# Altium footprint library TitansLib.PcbLib: 333 footprints (part 7 of 21)
Each footprint in its own frame and in the unit in brackets; x right, y up, seen from the top. Pads: shape width x height; smd on the part's side, far side on the other; paste and mask are expansions set on the pad; w line width, h text height; cw(c..) or ccw(c..) is an arc to the next point about the centre after c.
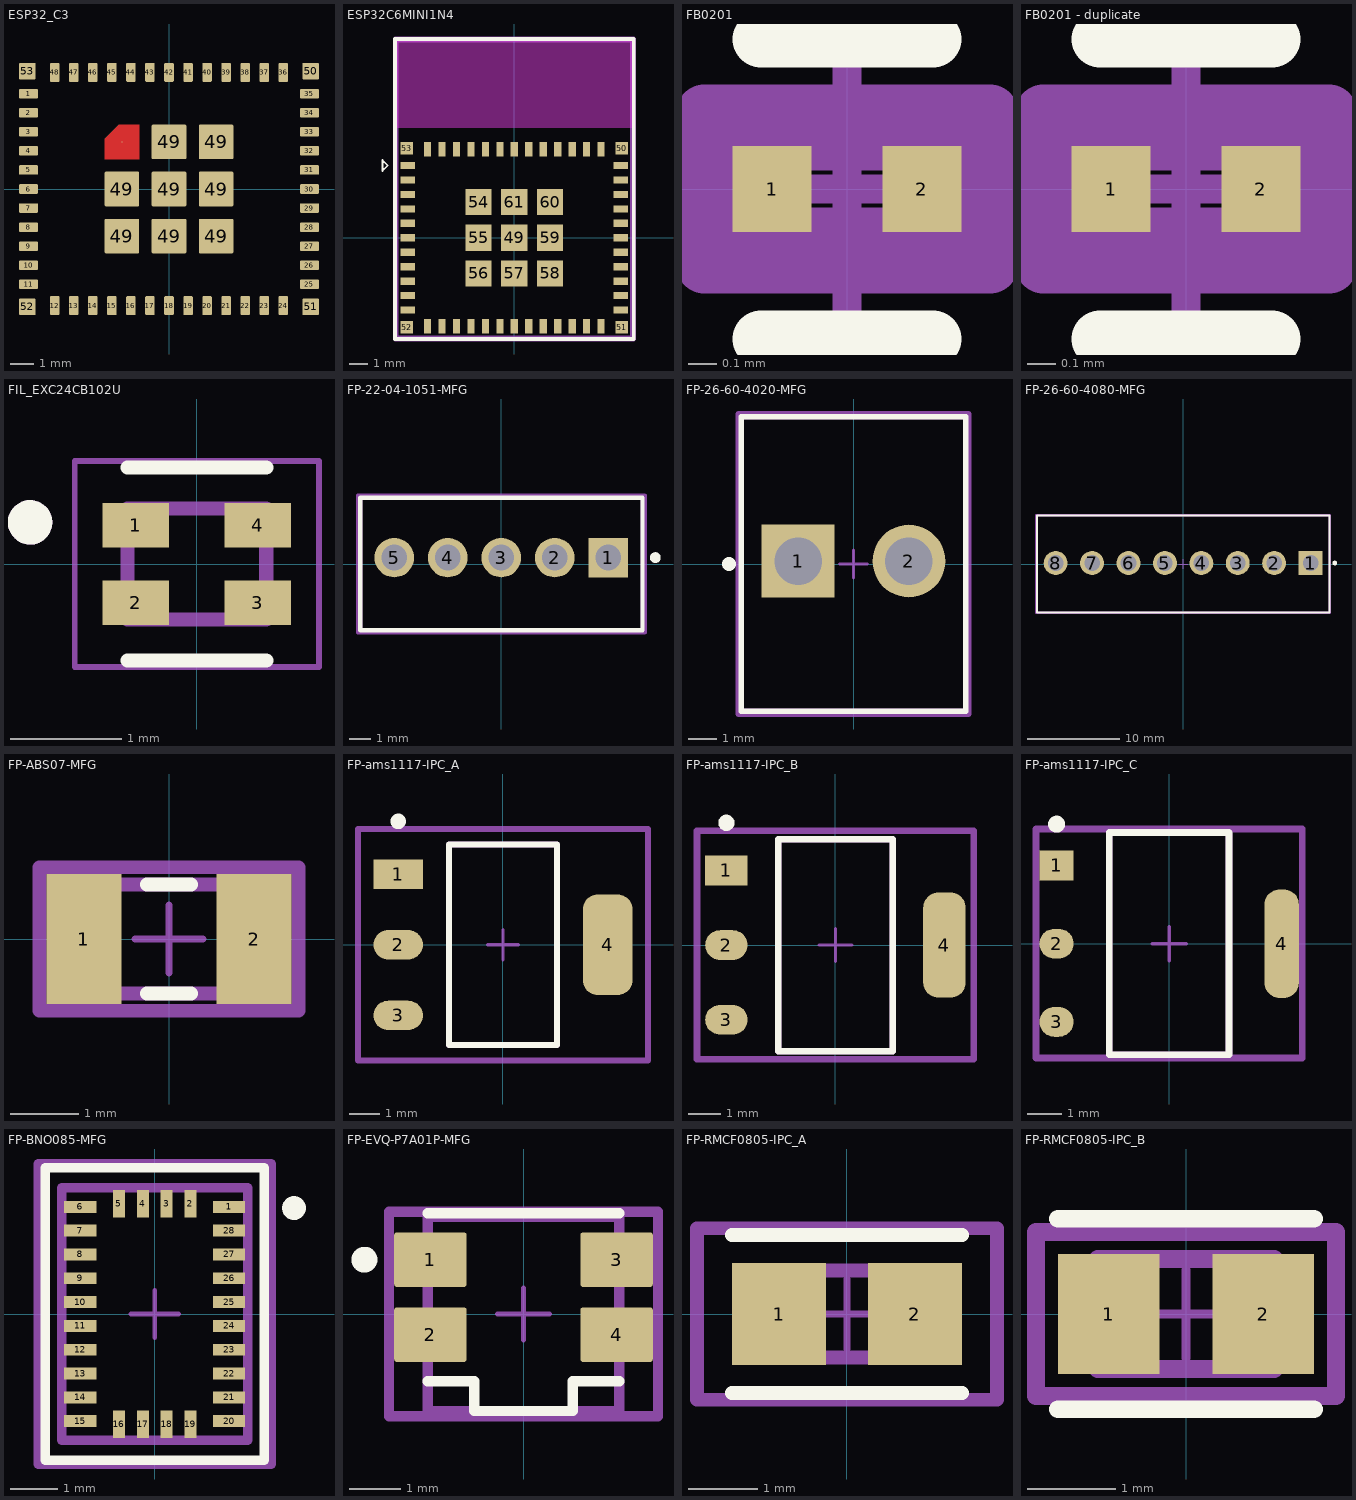
[diagram p6: the footprints below, top view; thin cyan lines are the x and y axes]

## ESP32_C3 [mm]
pads (61):
  rrect25% 0.8x0.4 smd mask+0.05: 1(-5.9,4) 2(-5.9,3.2) 3(-5.9,2.4) 4(-5.9,1.6) 5(-5.9,0.8) 6(-5.9,0) 7(-5.9,-0.8) 8(-5.9,-1.6) 9(-5.9,-2.4) 10(-5.9,-3.2) 11(-5.9,-4) 25(5.9,-4) 26(5.9,-3.2) 27(5.9,-2.4) 28(5.9,-1.6) 29(5.9,-0.8) 30(5.9,0) 31(5.9,0.8) 32(5.9,1.6) 33(5.9,2.4) 34(5.9,3.2) 35(5.9,4)
  rrect25% 0.4x0.8 smd mask+0.05: 12(-4.8,-4.9) 13(-4,-4.9) 14(-3.2,-4.9) 15(-2.4,-4.9) 16(-1.6,-4.9) 17(-0.799,-4.897) 18(0,-4.9) 19(0.8,-4.9) 20(1.6,-4.9) 21(2.4,-4.9) 22(3.2,-4.9) 23(4,-4.9) 24(4.8,-4.9) 36(4.8,4.9) 37(4,4.9) 38(3.2,4.9) 39(2.4,4.9) 40(1.6,4.9) 41(0.799,4.897) 42(0,4.9) 43(-0.8,4.9) 44(-1.6,4.9) 45(-2.4,4.9) 46(-3.2,4.9) 47(-4,4.9) 48(-4.8,4.9)
  rrect6% 1.45x1.45 smd mask+0.05: 49(-1.975,-1.975) 49(-1.975,0) 49(0,-1.975) 49(0,0) 49(0,1.975) 49(1.975,-1.975) 49(1.975,0) 49(1.975,1.975)
  round 0.025 smd mask+0.05: 49(-1.975,1.975)
  rrect14% 0.7x0.7 smd mask+0.05: 50(5.95,4.95) 51(5.95,-4.95) 52(-5.95,-4.95) 53(-5.95,4.95)
Top Layer:
  region: -1.25,1.25 -2.7,1.25 -2.7,2.1 -2.1,2.7 -1.25,2.7

## ESP32C6MINI1N4 [mm]
pads (61):
  rect 0.8x0.4 smd mask+0.1: 1(-5.9,4) 2(-5.9,3.2) 3(-5.9,2.4) 4(-5.9,1.6) 5(-5.9,0.8) 6(-5.9,0) 7(-5.9,-0.8) 8(-5.9,-1.6) 9(-5.9,-2.4) 10(-5.9,-3.2) 11(-5.9,-4) 25(5.9,-4) 26(5.9,-3.2) 27(5.9,-2.4) 28(5.9,-1.6) 29(5.9,-0.8) 30(5.9,0) 31(5.9,0.8) 32(5.9,1.6) 33(5.9,2.4) 34(5.9,3.2) 35(5.9,4)
  rect 0.4x0.8 smd mask+0.1: 12(-4.8,-4.9) 13(-4,-4.9) 14(-3.2,-4.9) 15(-2.4,-4.9) 16(-1.6,-4.9) 17(-0.8,-4.9) 18(0,-4.9) 19(0.8,-4.9) 20(1.6,-4.9) 21(2.4,-4.9) 22(3.2,-4.9) 23(4,-4.9) 24(4.8,-4.9) 36(4.8,4.9) 37(4,4.9) 38(3.2,4.9) 39(2.4,4.9) 40(1.6,4.9) 41(0.8,4.9) 42(0,4.9) 43(-0.8,4.9) 44(-1.6,4.9) 45(-2.4,4.9) 46(-3.2,4.9) 47(-4,4.9) 48(-4.8,4.9)
  rect 1.45x1.45 smd mask+0.1: 49(0,0) 54(-1.975,1.975) 55(-1.975,0) 56(-1.975,-1.975) 57(0,-1.975) 58(1.975,-1.975) 59(1.975,0) 60(1.975,1.975) 61(0,1.975)
  rect 0.7x0.7 smd mask+0.1: 50(5.95,4.95) 51(5.95,-4.95) 52(-5.95,-4.95) 53(-5.95,4.95)
Top Overlay:
  lines w0.1: -7.3,3.7 -7,4 -7.3,4.3 -7.3,3.7
  lines w0.2: -6.6,-5.6 -6.6,11 6.6,11 6.6,-5.6 -6.6,-5.6
Keep-Out Layer:
  region: -6.6,11 -6.6,6.1 6.6,6.1 6.6,11
Top Assembly:
  lines w0.1: -6.446,-5.446 6.445,-5.446 6.445,10.846 -6.446,10.846 -6.446,-5.446
  text ".Designator" at -2.025,3.413 h1
Mechanical 13:
  lines w0.1: -6.6,-5.6 -6.6,11 6.6,11 6.6,-5.6 -6.6,-5.6
Mechanical 15:
  lines w0.254: -6.6,-5.6 -6.6,11 6.6,11 6.6,-5.6 -6.6,-5.6
3D body "ESP32-C6-MINI-1-N4.stp": height 2.55, standoff 0, extent -6.6,-5.6 6.6,11

## FB0201 [mm]
pads (2):
  rect 0.275x0.3 smd paste+0 mask+0.05: 1(-0.262,0) 2(0.262,0)
Top Overlay:
  lines w0.2: -0.3,-0.525 0.3,-0.525 ; -0.3,0.525 0.3,0.525
Top 3D Body:
  lines w0.2: -0.315,-0.165 -0.315,0.165 0.315,0.165 0.315,-0.165 -0.315,-0.165
Top Courtyard:
  lines w0.2: -0.5,-0.265 -0.5,0.265 0.5,0.265 0.5,-0.265 -0.5,-0.265
Top Component Center:
  lines w0.1: -0.5,0 0.5,0 ; 0,-0.5 0,0.5
Top Assembly:
  lines w0.2: -0.5,-0.265 -0.5,0.265 0.5,0.265 0.5,-0.265 -0.5,-0.265
3D body "FBead_Murata_BLM03HB401SN1D_eec.STEP": height 0.25, standoff 0, extent -0.5,-0.265 0.5,0.265

## FB0201 - duplicate [mm]
pads (2):
  rect 0.275x0.3 smd paste+0 mask+0.05: 1(-0.262,0) 2(0.262,0)
Top Overlay:
  lines w0.2: -0.3,-0.525 0.3,-0.525 ; -0.3,0.525 0.3,0.525
Top 3D Body:
  lines w0.2: -0.315,-0.165 -0.315,0.165 0.315,0.165 0.315,-0.165 -0.315,-0.165
Top Courtyard:
  lines w0.2: -0.5,-0.265 -0.5,0.265 0.5,0.265 0.5,-0.265 -0.5,-0.265
Top Component Center:
  lines w0.1: -0.5,0 0.5,0 ; 0,-0.5 0,0.5
Top Assembly:
  lines w0.2: -0.5,-0.265 -0.5,0.265 0.5,0.265 0.5,-0.265 -0.5,-0.265
3D body "FBead_Murata_BLM03HB401SN1D_eec.STEP": height 0.25, standoff 0, extent -0.5,-0.265 0.5,0.265

## FIL_EXC24CB102U [mm]
pads (4):
  rect 0.6x0.4 smd: 1(-0.55,0.35) 2(-0.55,-0.35) 3(0.55,-0.35) 4(0.55,0.35)
Top Overlay:
  circle w0.2: c-1.5,0.375 r0.1
  lines w0.127: -0.625,-0.87 0.625,-0.87 ; -0.625,0.87 0.625,0.87
Mechanical 13:
  circle w0.2: c-1.5,0.375 r0.1
  lines w0.127: -0.625,-0.5 -0.625,0.5 0.625,0.5 0.625,-0.5 -0.625,-0.5
Mechanical 15:
  lines w0.05: -1.1,-0.927 1.1,-0.927 1.1,0.927 -1.1,0.927 -1.1,-0.927
3D body "step_temp.STEP": height 0.6, standoff 0, extent -0.625,-0.5 0.625,0.5

## FP-22-04-1051-MFG [mm]
pads (5):
  rect 1.85x1.85 hole 1.2 paste-2539.97 mask+0: 1(5,0.3)
  round 1.85 hole 1.2 paste-2539.97 mask+0: 2(2.5,0.3) 3(0,0.3) 4(-2.5,0.3) 5(-5,0.3)
Top Overlay:
  circle w0.25: c7.2,0.3 r0.125
  lines w0.2: -6.6,-3.1 -6.6,3.1 6.6,3.1 6.6,-3.1 -6.6,-3.1
Top 3D Body:
  lines w0.2: -6.6,-3.1 -6.6,3.1 6.6,3.1 6.6,-3.1 -6.6,-3.1
Top Courtyard:
  lines w0.2: -6.7,-3.2 -6.7,3.2 6.7,3.2 6.7,-3.2 -6.7,-3.2
Top Component Center:
  lines w0.1: -0.5,0 0.5,0 ; 0,-0.5 0,0.5
Top Assembly:
  lines w0.2: -6.7,-3.2 -6.7,3.2 6.7,3.2 6.7,-3.2 -6.7,-3.2
  text ".Designator" at 0,0.188 h1
3D body "Conn_Molex_22-04-1051_eec.STEP": height 0.25, standoff 0, extent -6.7,-3.2 6.7,3.2

## FP-26-60-4020-MFG [mm]
pads (2):
  rect 2.6x2.6 hole 1.7 paste-2539.97 mask+0: 1(-1.98,0.105)
  round 2.6 hole 1.7 paste-2539.97 mask+0: 2(1.98,0.105)
Top Overlay:
  circle w0.25: c-4.45,0 r0.125
  lines w0.2: -4.01,-5.26 4.01,-5.26 4.01,5.26 -4.01,5.26 -4.01,-5.26
Top 3D Body:
  lines w0.2: -4.01,-5.26 4.01,-5.26 4.01,5.26 -4.01,5.26 -4.01,-5.26
Top Courtyard:
  lines w0.2: -4.11,-5.36 4.11,-5.36 4.11,5.36 -4.11,5.36 -4.11,-5.36
Top Component Center:
  lines w0.1: -0.5,0 0.5,0 ; 0,-0.5 0,0.5
Top Assembly:
  lines w0.2: -4.11,-5.36 4.11,-5.36 4.11,5.36 -4.11,5.36 -4.11,-5.36
  text ".Designator" at 0,0.188 h1
3D body "Conn_Molex_26-60-4020_eec.STEP": height 0.25, standoff 0, extent -4.11,-5.36 4.11,5.36

## FP-26-60-4080-MFG [mm]
pads (8):
  rect 2.6x2.6 hole 1.7 paste-2539.97 mask+0: 1(13.86,0.105)
  round 2.6 hole 1.7 paste-2539.97 mask+0: 2(9.9,0.105) 3(5.94,0.105) 4(1.98,0.105) 5(-1.98,0.105) 6(-5.94,0.105) 7(-9.9,0.105) 8(-13.86,0.105)
Top Overlay:
  circle w0.25: c16.5,0.105 r0.125
  lines w0.2: -15.9,-5.26 -15.9,5.26 15.9,5.26 15.9,-5.26 -15.9,-5.26
Top 3D Body:
  lines w0.2: -15.9,-5.26 -15.9,5.26 15.9,5.26 15.9,-5.26 -15.9,-5.26
Top Courtyard:
  lines w0.2: -16,-5.36 -16,5.36 16,5.36 16,-5.36 -16,-5.36
Top Component Center:
  lines w0.1: -0.5,0 0.5,0 ; 0,-0.5 0,0.5
Top Assembly:
  lines w0.2: -16,-5.36 -16,5.36 16,5.36 16,-5.36 -16,-5.36
  text ".Designator" at 0,0.188 h1
3D body "Conn_Molex_26-60-4080_eec.STEP": height 0.25, standoff 0, extent -16,-5.36 16,5.36

## FP-ABS07-MFG [mm]
pads (2):
  rect 1.1x1.9 smd paste+0 mask+0: 1(-1.25,0) 2(1.25,0)
Top Overlay:
  lines w0.2: -0.325,-0.8 0.325,-0.8 ; -0.325,0.8 0.325,0.8
Top 3D Body:
  lines w0.2: -1.65,-0.8 1.65,-0.8 1.65,0.8 -1.65,0.8 -1.65,-0.8
Top Courtyard:
  lines w0.2: -1.9,-1.05 1.9,-1.05 1.9,1.05 -1.9,1.05 -1.9,-1.05
Top Component Center:
  lines w0.1: -0.5,0 0.5,0 ; 0,-0.5 0,0.5
Top Assembly:
  lines w0.2: -1.9,-1.05 1.9,-1.05 1.9,1.05 -1.9,1.05 -1.9,-1.05
3D body "Crys_Abracon_ABS07-166-32_768KHZ-T_eec.STEP": height 0.25, standoff 0, extent -1.9,-1.05 1.9,1.05

## FP-ams1117-IPC_A [mm]
pads (4):
  rect 1.604x0.952 smd paste+0 mask+0: 1(-3.395,2.29)
  rrect100% 1.604x0.952 smd paste+0 mask+0: 2(-3.395,0) 3(-3.395,-2.29)
  rrect59% 1.604x3.262 smd paste+0 mask+0: 4(3.395,0)
Top Overlay:
  circle w0.25: c-3.395,4 r0.125
  lines w0.2: -1.753,-3.253 -1.753,3.253 1.753,3.253 1.753,-3.253 -1.753,-3.253
Top 3D Body:
  lines w0.2: -1.753,-3.253 -1.753,3.253 1.753,3.253 1.753,-3.253 -1.753,-3.253
Top Courtyard:
  lines w0.2: -4.697,-3.752 -4.697,3.752 4.697,3.752 4.697,-3.752 -4.697,-3.752
Top Component Center:
  lines w0.1: -0.5,0 0.5,0 ; 0,-0.5 0,0.5
Top Assembly:
  lines w0.2: -4.697,-3.752 -4.697,3.752 4.697,3.752 4.697,-3.752 -4.697,-3.752
  text ".Designator" at 0,0.188 h1
3D body "IC_Advanced_Monolithic_Systems_ams1117_eec.STEP": height 0.25, standoff 0, extent -4.697,-3.752 4.697,3.752

## FP-ams1117-IPC_B [mm]
pads (4):
  rect 1.304x0.912 smd paste+0 mask+0: 1(-3.345,2.29)
  rrect100% 1.304x0.912 smd paste+0 mask+0: 2(-3.345,0) 3(-3.345,-2.29)
  rrect70% 1.304x3.222 smd paste+0 mask+0: 4(3.345,0)
Top Overlay:
  circle w0.25: c-3.345,3.75 r0.125
  lines w0.2: -1.753,-3.253 1.753,-3.253 1.753,3.253 -1.753,3.253 -1.753,-3.253
Top 3D Body:
  lines w0.2: -1.753,-3.253 1.753,-3.253 1.753,3.253 -1.753,3.253 -1.753,-3.253
Top Courtyard:
  lines w0.2: -4.247,-3.502 4.247,-3.502 4.247,3.502 -4.247,3.502 -4.247,-3.502
Top Component Center:
  lines w0.1: -0.5,0 0.5,0 ; 0,-0.5 0,0.5
Top Assembly:
  lines w0.2: -4.247,-3.502 4.247,-3.502 4.247,3.502 -4.247,3.502 -4.247,-3.502
  text ".Designator" at 0,0.188 h1
3D body "IC_Advanced_Monolithic_Systems_ams1117_eec.STEP": height 0.25, standoff 0, extent -4.247,-3.502 4.247,3.502

## FP-ams1117-IPC_C [mm]
pads (4):
  rect 1.004x0.872 smd paste+0 mask+0: 1(-3.295,2.29)
  rrect100% 1.004x0.872 smd paste+0 mask+0: 2(-3.295,0) 3(-3.295,-2.29)
  rrect87% 1.004x3.182 smd paste+0 mask+0: 4(3.295,0)
Top Overlay:
  circle w0.25: c-3.295,3.5 r0.125
  lines w0.2: -1.753,-3.253 -1.753,3.253 1.753,3.253 1.753,-3.253 -1.753,-3.253
Top 3D Body:
  lines w0.2: -1.753,-3.253 -1.753,3.253 1.753,3.253 1.753,-3.253 -1.753,-3.253
Top Courtyard:
  lines w0.2: -3.897,-3.353 -3.897,3.353 3.897,3.353 3.897,-3.353 -3.897,-3.353
Top Component Center:
  lines w0.1: -0.5,0 0.5,0 ; 0,-0.5 0,0.5
Top Assembly:
  lines w0.2: -3.897,-3.353 -3.897,3.353 3.897,3.353 3.897,-3.353 -3.897,-3.353
  text ".Designator" at 0,0.188 h1
3D body "IC_Advanced_Monolithic_Systems_ams1117_eec.STEP": height 0.25, standoff 0, extent -3.897,-3.353 3.897,3.353

## FP-BNO085-MFG [mm]
pads (28):
  rect 0.675x0.25 smd paste+0 mask+0: 1(1.562,2.25) 6(-1.562,2.25) 7(-1.562,1.75) 8(-1.562,1.25) 9(-1.562,0.75) 10(-1.562,0.25) 11(-1.562,-0.25) 12(-1.562,-0.75) 13(-1.562,-1.25) 14(-1.562,-1.75) 15(-1.562,-2.25) 20(1.562,-2.25) 21(1.562,-1.75) 22(1.562,-1.25) 23(1.562,-0.75) 24(1.562,-0.25) 25(1.562,0.25) 26(1.562,0.75) 27(1.562,1.25) 28(1.562,1.75)
  rect 0.25x0.575 smd paste+0 mask+0: 2(0.75,2.312) 3(0.25,2.312) 4(-0.25,2.312) 5(-0.75,2.312) 16(-0.75,-2.312) 17(-0.25,-2.312) 18(0.25,-2.312) 19(0.75,-2.312)
Top Overlay:
  circle w0.25: c2.925,2.225 r0.125
  lines w0.2: -2.3,-3.075 2.3,-3.075 2.3,3.075 -2.3,3.075 -2.3,-3.075
Top 3D Body:
  lines w0.2: -1.95,-2.65 1.95,-2.65 1.95,2.65 -1.95,2.65 -1.95,-2.65
Top Courtyard:
  lines w0.2: -2.45,-3.15 2.45,-3.15 2.45,3.15 -2.45,3.15 -2.45,-3.15
Top Component Center:
  lines w0.1: -0.5,0 0.5,0 ; 0,-0.5 0,0.5
Top Assembly:
  lines w0.2: -2.45,-3.15 2.45,-3.15 2.45,3.15 -2.45,3.15 -2.45,-3.15
3D body "IC_Hillcrest_Laboratories_Inc_BNO085_eec.STEP": height 0.25, standoff 0, extent -2.45,-3.15 2.45,3.15

## FP-EVQ-P7A01P-MFG [mm]
pads (4):
  rrect9% 1.4x1.05 smd paste+0 mask+0.075: 1(-1.8,1.05) 2(-1.8,-0.4) 3(1.8,1.05) 4(1.8,-0.4)
Top Overlay:
  circle w0.25: c-3.075,1.05 r0.125
  lines w0.2: -1.85,-1.3 -0.95,-1.3 -0.95,-1.875 0.95,-1.875 0.95,-1.3 1.85,-1.3 ; -1.85,1.95 1.85,1.95
Top 3D Body:
  lines w0.2: -1.85,-1.875 -1.85,1.875 1.85,1.875 1.85,-1.875 -1.85,-1.875
Top Courtyard:
  lines w0.2: -2.6,-1.975 -2.6,1.975 2.6,1.975 2.6,-1.975 -2.6,-1.975
Top Component Center:
  lines w0.1: -0.5,0 0.5,0 ; 0,-0.5 0,0.5
Top Assembly:
  lines w0.2: -2.6,-1.975 -2.6,1.975 2.6,1.975 2.6,-1.975 -2.6,-1.975
  text ".Designator" at -2.205,0.713 h1
3D body "Switch_Panasonic_EVQ-P7A01P_eec.STEP": height 0.25, standoff 0, extent -2.6,-1.975 2.6,1.975

## FP-RMCF0805-IPC_A [mm]
pads (2):
  rect 1.355x1.462 smd paste+0 mask+0: 1(-0.976,0) 2(0.976,0)
Top Overlay:
  lines w0.2: -1.653,-1.131 1.653,-1.131 ; -1.653,1.131 1.653,1.131
Top 3D Body:
  lines w0.2: -1,-0.625 1,-0.625 1,0.625 -1,0.625 -1,-0.625
Top Courtyard:
  lines w0.2: -2.153,-1.231 2.153,-1.231 2.153,1.231 -2.153,1.231 -2.153,-1.231
Top Component Center:
  lines w0.1: -0.5,0 0.5,0 ; 0,-0.5 0,0.5
Top Assembly:
  lines w0.2: -2.153,-1.231 2.153,-1.231 2.153,1.231 -2.153,1.231 -2.153,-1.231
  text ".Designator" at 0,0.188 h1
3D body "Res_Stackpole_Electronics_RMCF0805JT220K_eec.STEP": height 0.25, standoff 0, extent -2.153,-1.231 2.153,1.231

## FP-RMCF0805-IPC_B [mm]
pads (2):
  rect 1.155x1.362 smd paste+0 mask+0: 1(-0.876,0) 2(0.876,0)
Top Overlay:
  lines w0.2: -1.453,-1.081 1.453,-1.081 ; -1.453,1.081 1.453,1.081
Top 3D Body:
  lines w0.2: -1,-0.625 -1,0.625 1,0.625 1,-0.625 -1,-0.625
Top Courtyard:
  lines w0.2: -1.703,-0.931 -1.703,0.931 1.703,0.931 1.703,-0.931 -1.703,-0.931
Top Component Center:
  lines w0.1: -0.5,0 0.5,0 ; 0,-0.5 0,0.5
Top Assembly:
  lines w0.2: -1.703,-0.931 -1.703,0.931 1.703,0.931 1.703,-0.931 -1.703,-0.931
  text ".Designator" at 0,0.188 h1
3D body "Res_Stackpole_Electronics_RMCF0805JT220K_eec.STEP": height 0.25, standoff 0, extent -1.703,-0.931 1.703,0.931